# Altium footprint library 3-282836-3.PcbLib: 1 footprints
Each footprint in its own frame and in the unit in brackets; x right, y up, seen from the top. Pads: shape width x height; smd on the part's side, far side on the other; paste and mask are expansions set on the pad; w line width, h text height; cw(c..) or ccw(c..) is an arc to the next point about the centre after c.
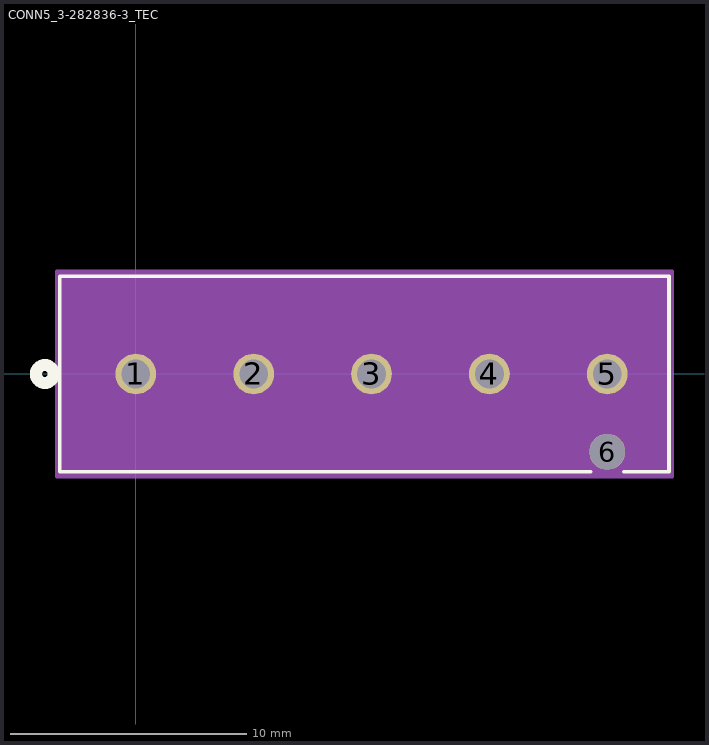
[diagram p0: the footprint, top view; thin cyan lines are the x and y axes]

## CONN5_3-282836-3_TEC [mil]
pads (6):
  round 68 hole 48 paste-34 mask+0: 1(0,0) 2(196.85,0) 3(393.7,0) 4(590.55,0) 5(787.4,0)
  round 60 hole 60 unplated paste+0 mask+0: 6(787.4,-129.92)
Top Overlay:
  circle w20: c-152.05,0 r15
  lines w6: 759.7,-162.94 -126.81,-162.94 -126.81,162.94 890.59,162.94 890.59,-162.94 815.1,-162.94
  text ".Designator" at 244.39,-25 h50
Bottom Overlay:
  circle w20: c-152.05,0 r15
Mechanical 13:
  circle w20: c0,-75 r15
  lines w1: -122.05,-161.42 885.83,-161.42 885.83,161.42 -122.05,161.42 -122.05,-161.42
  text ".Designator" at 244.39,-25 h50
Mechanical 15:
  region: 895.83,171.42 -132.05,171.42 -132.05,-171.42 895.83,-171.42
  lines w6: -132.05,-171.42 -132.05,171.42 895.83,171.42 895.83,-171.42 -132.05,-171.42